# Altium integrated library CH32V003J4M6_kit.IntLib: 18 symbols
Pins are listed as number, name and electrical type; pins without a type are passive.

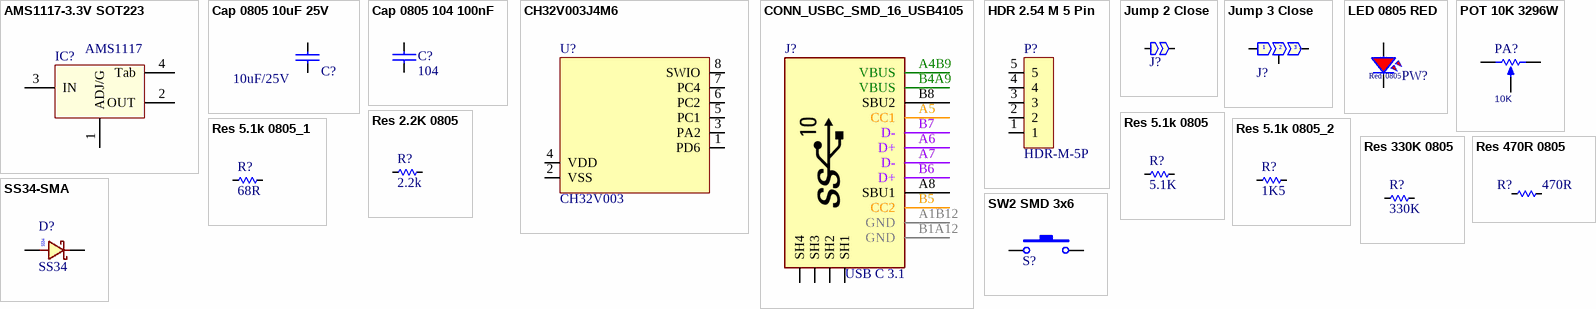
[diagram p0: symbols AMS1117-3.3V SOT223 to SW2 SMD 3x6]

## AMS1117-3.3V SOT223
designator IC?, comment AMS1117
SOT-223; Code: 5102-034
footprint SOT223-4N (SOT223, 4-Leads, Body 6.5x3.5mm, Pitch 2.3mm, Lead Span 7mm, IPC Medium Density)
pins: 1 ADJ/G, 2 OUT, 3 IN, 4 Tab

## Cap 0805 10uF 25V
designator C?, comment 10uF/25V
Cap SMD 0805 10uF; Code: 1436-100
footprint C_0805_SMD
pins: 1, 2

## Cap 0805 104 100nF
designator C?, comment 104
Cap SMD 0805 104-100nF-0.1uF 50V; Code: 1438-080
footprint C_0805_SMD
pins: 1, 2

## CH32V003J4M6
designator U?, comment CH32V003
ROM 16KB, SRAM 2KB, 1920B BootLoader; Designed by: Nhox; Code: N/A
footprint SO_8 (SOP-8, 5x3.9mm body 1.27mm pitch, SOT96-1, M08A, S8, SOIC8, VO8, MS-012AA(JEDEC), R-8, 8S2, VOG8)
pins: 1 PD6, 2 VSS, 3 PA2, 4 VDD, 5 PC1, 6 PC2, 7 PC4, 8 SWIO

## CONN_USBC_SMD_16_USB4105
designator J?, comment USB C 3.1
CONN, USB, Type C, USB 2.0, Right-Angle, SMD; Code: 3518-006; Rule: UNIONINDEX=0|RULEKIND=Clearance|NETSCOPE=DifferentNets|LAYERKIND=SameLayer|NAME=Schematic Clearance Constraint|GAP=10mil|GENERICCLEARANCE=10mil|IGNOREPADTOPADCLEARANCEINFOOTPRINT=TRUE|OBJECTCLEARANCES=ClearanceObj_Arc-ClearanceObj_Arc:50000;ClearanceObj_Arc-ClearanceObj_Track:50000;ClearanceObj_Arc-ClearanceObj_SMDPad:50000;ClearanceObj_Arc-ClearanceObj_THPad:50000;ClearanceObj_Arc-ClearanceObj_Hole:0;ClearanceObj_Track-ClearanceObj_Track:50000;ClearanceObj_Track-ClearanceObj_SMDPad:50000;ClearanceObj_Track-ClearanceObj_THPad:50000;ClearanceObj_Track-ClearanceObj_Hole:0;ClearanceObj_SMDPad-ClearanceObj_SMDPad:50000;ClearanceObj_SMDPad-ClearanceObj_THPad:50000;ClearanceObj_SMDPad-ClearanceObj_Fill:50000;ClearanceObj_SMDPad-ClearanceObj_Poly:50000;ClearanceObj_SMDPad-ClearanceObj_Region:50000;ClearanceObj_SMDPad-ClearanceObj_Hole:0;ClearanceObj_THPad-ClearanceObj_Hole:0;ClearanceObj_Via-ClearanceObj_Hole:0;ClearanceObj_Fill-ClearanceObj_Hole:0;ClearanceObj_Poly-ClearanceObj_Hole:0;ClearanceObj_Region-ClearanceObj_Hole:0;ClearanceObj_Text-ClearanceObj_Hole:0|UNIT=Imperial
footprint USBC_SMD_16_USB4105 PAD L (CONN, USB, Type C, USB4105, popular*)
footprint USBC_SMD_16_USB4105 (CONN, USB, Type C, USB4105, popular*)
pins: A1B12 GND, A4B9 VBUS, A5 CC1, A6 D+, A7 D-, A8 SBU1, B1A12 GND, B4A9 VBUS, B5 CC2, B6 D+, B7 D-, B8 SBU2, SH1, SH2, SH3, SH4

## HDR 2.54 M 5 Pin
designator P?, comment HDR-M-5P
HDR 2.54 MALE; Code: 3504-028 * 0.125
footprint HDR_M_1X5 (Connector; Header; 2 Position)
pins: 1, 2, 3, 4, 5

## Jump 2 Close
designator J?, comment JP2-Close  (value not drawn)
Jumper, 2-Pin, Nho them hang rao; Code: 3504-001; Code_sub1: 3504-028 * 0.05pcs
footprint JUMP2-CLOSED
pins: 1, 2

## Jump 3 Close
designator J?, comment JP3-Close  (value not drawn)
Jumper, 3-Pin; Code: 3504-001; Code_sub1: 3504-028 * 0.1pcs
footprint JUMP3-CLOSED
pins: 1, 2, 3

## LED 0805 RED
designator PW?, comment LED RED  (value not drawn)
LED 0805 SMD RED; Code: 8600-017; Designed by: TranLuyen
footprint LED 0805 Red
pins: 1, 2
text: Red; 0805

## POT 10K 3296W
designator PA?, comment 10K
RESISTOR, THD, Potentiometer; Code: 1103-027
footprint POT_3296W (POT, TRIM, 10.0X5.0mm, pitch: 2.5mm 3299W 3296W S64W)
footprint POT_3296W_R (POT, TRIM, 10.0X5.0mm, pitch: 2.5mm 3299W 3296W S64W)
pins: 1 TOP, 2 TAP, 3 BOT

## Res 2.2K 0805
designator R?, comment 2.2k
Resistor SMD 0805; Code: 1024-094
footprint RES-SMD-0805
pins: 1, 2

## Res 5.1k 0805
designator R?, comment 5.1K
Resistor SMD 0805; Code: 1024-104
footprint RES-SMD-0805
pins: 1, 2

## Res 5.1k 0805_1
designator R?, comment 68R
Resistor SMD 0805; Code: 1024-104
footprint RES-SMD-0805
pins: 1, 2

## Res 5.1k 0805_2
designator R?, comment 1K5
Resistor SMD 0805; Code: 1024-104
footprint RES-SMD-0805
pins: 1, 2

## Res 330K 0805
designator R?, comment 330K
Resistor SMD 0805; Code: 1024-149
footprint RES-SMD-0805
pins: 1, 2

## Res 470R 0805
designator R?, comment 470R
Resistor SMD 0805; Code: 1024-078; Value: 470R
footprint RES-SMD-0805
pins: 1, 2

## SS34-SMA
designator D?, comment SS34
Surface-Mount Schottky Barrier Rectifier; Code: 2005-008; Value: SS34
footprint D_SMA (SMA Molded Diode, 2-Leads, Body 4.3x2.7mm, SOD-128)
pins: 1 A, 2 K

## SW2 SMD 3x6
designator S?, comment SW-SMD  (value not drawn)
Button 3x6 mm x 2.5mm 2Pin SMD; Code: 3606-006
footprint SW-SMD 3x6 mm (Switch SMD type)
pins: 1, 2